# Altium footprint library WE-HCFT.PcbLib: 57 footprints (part 1 of 4)
Each footprint in its own frame and in the unit in brackets; x right, y up, seen from the top. Pads: shape width x height; smd on the part's side, far side on the other; paste and mask are expansions set on the pad; w line width, h text height; cw(c..) or ccw(c..) is an arc to the next point about the centre after c.
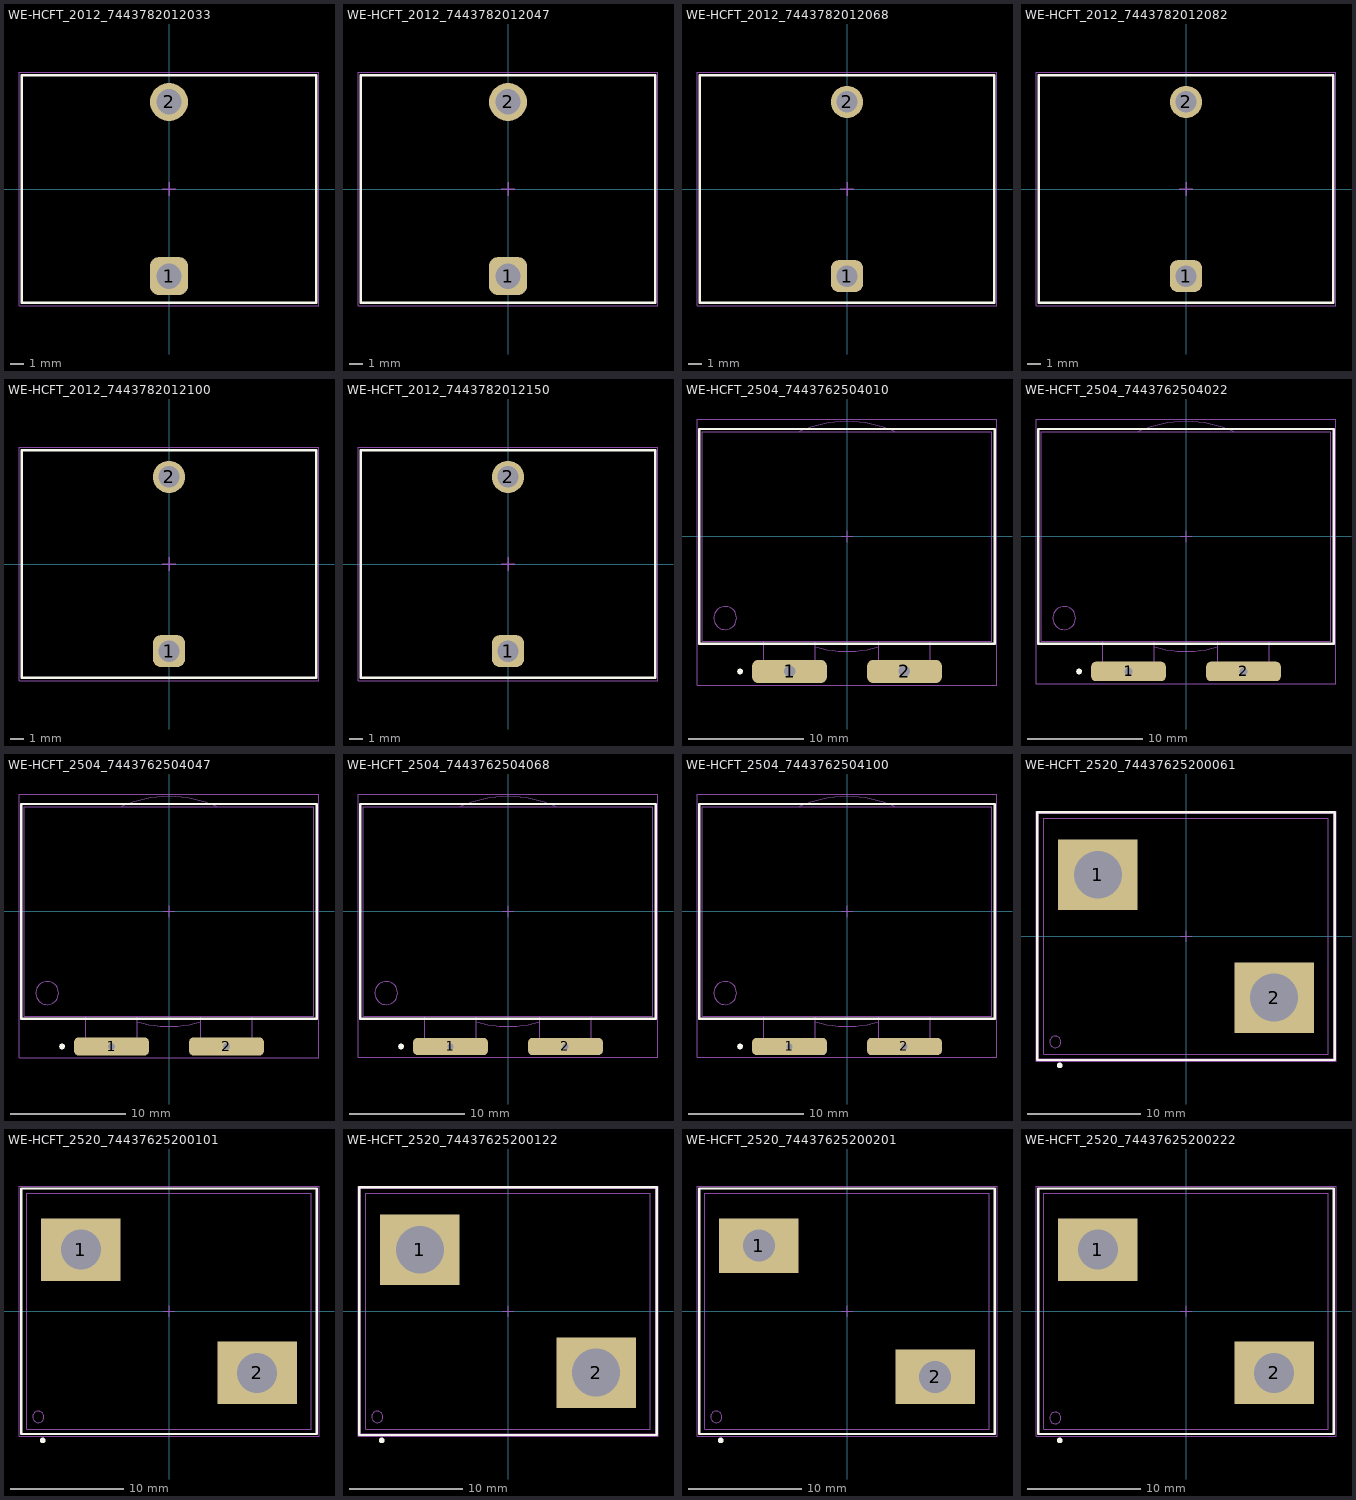
[diagram p0: the footprints below, top view; thin cyan lines are the x and y axes]

## WE-HCFT_2012_7443782012033 [mm] "THT High Current Inductor, body 22x17mm"
height 13.5
pads (2):
  rrect50% 2.85x2.85 hole 1.9: 1(0,-6.5)
  round 2.85 hole 1.9: 2(0,6.5)
Top Overlay:
  lines w0.2: -11,-8.5 11,-8.5 11,8.5 -11,8.5 -11,-8.5
Top Assembly:
  lines w0.1: -11,-8.5 11,-8.5 11,8.5 -11,8.5 -11,-8.5
Top Designator:
  text ".Designator" at -3.647,-0.357 h1
Top 3D Body:
  lines w0.1: -11,-8.5 -11,8.5 11,8.5 11,-8.5 -11,-8.5
Top Courtyard:
  lines w0.05: -11.2,-8.7 11.2,-8.7 11.2,8.7 -11.2,8.7 -11.2,-8.7
Top Component Center:
  lines w0.1: -0.5,0 0.5,0 ; 0,-0.5 0,0.5
3D body "2012_7443782012xxx_1,5 wire.stp": height 13.18, standoff -3.72, extent -10.584,-7.447 10.584,7.45

## WE-HCFT_2012_7443782012047 [mm] "THT High Current Inductor, body 22x17mm"
height 13.5
pads (2):
  rrect50% 2.85x2.85 hole 1.9: 1(0,-6.5)
  round 2.85 hole 1.9: 2(0,6.5)
Top Overlay:
  lines w0.2: -11,-8.5 -11,8.5 11,8.5 11,-8.5 -11,-8.5
Top Assembly:
  lines w0.1: -11,-8.5 -11,8.5 11,8.5 11,-8.5 -11,-8.5
Top Designator:
  text ".Designator" at -3.647,-0.357 h1
Top 3D Body:
  lines w0.1: -11,-8.5 11,-8.5 11,8.5 -11,8.5 -11,-8.5
Top Courtyard:
  lines w0.05: -11.2,-8.7 -11.2,8.7 11.2,8.7 11.2,-8.7 -11.2,-8.7
Top Component Center:
  lines w0.1: -0.5,0 0.5,0 ; 0,-0.5 0,0.5
3D body "2012_7443782012xxx_1,5 wire.stp": height 13.18, standoff -3.72, extent -10.584,-7.447 10.584,7.45

## WE-HCFT_2012_7443782012068 [mm] "THT High Current Inductor, body 22x17mm"
height 13.5
pads (2):
  rrect50% 2.4x2.4 hole 1.6: 1(0,-6.5)
  round 2.4 hole 1.6: 2(0,6.5)
Top Overlay:
  lines w0.2: -11,-8.5 -11,8.5 11,8.5 11,-8.5 -11,-8.5
Top Assembly:
  lines w0.1: -11,-8.5 -11,8.5 11,8.5 11,-8.5 -11,-8.5
Top Designator:
  text ".Designator" at -3.647,-0.357 h1
Top 3D Body:
  lines w0.1: -11,-8.5 11,-8.5 11,8.5 -11,8.5 -11,-8.5
Top Courtyard:
  lines w0.05: -11.2,-8.7 -11.2,8.7 11.2,8.7 11.2,-8.7 -11.2,-8.7
Top Component Center:
  lines w0.1: -0.5,0 0.5,0 ; 0,-0.5 0,0.5
3D body "7443782012xxx_1,2 wire.stp": height 13.18, standoff -3.72, extent -10.584,-7.099 10.584,7.352

## WE-HCFT_2012_7443782012082 [mm] "THT High Current Inductor, body 22x17mm"
height 13.5
pads (2):
  rrect50% 2.4x2.4 hole 1.6: 1(0,-6.5)
  round 2.4 hole 1.6: 2(0,6.5)
Top Overlay:
  lines w0.2: -11,-8.5 11,-8.5 11,8.5 -11,8.5 -11,-8.5
Top Assembly:
  lines w0.1: -11,-8.5 11,-8.5 11,8.5 -11,8.5 -11,-8.5
Top Designator:
  text ".Designator" at -3.647,-0.357 h1
Top 3D Body:
  lines w0.1: -11,-8.5 -11,8.5 11,8.5 11,-8.5 -11,-8.5
Top Courtyard:
  lines w0.05: -11.2,-8.7 11.2,-8.7 11.2,8.7 -11.2,8.7 -11.2,-8.7
Top Component Center:
  lines w0.1: -0.5,0 0.5,0 ; 0,-0.5 0,0.5
3D body "7443782012xxx_1,2 wire.stp": height 13.18, standoff -3.72, extent -10.584,-7.099 10.584,7.352

## WE-HCFT_2012_7443782012100 [mm] "THT High Current Inductor, body 22x17mm"
height 13.5
pads (2):
  rrect50% 2.4x2.4 hole 1.6: 1(0,-6.5)
  round 2.4 hole 1.6: 2(0,6.5)
Top Overlay:
  lines w0.2: -11,-8.5 11,-8.5 11,8.5 -11,8.5 -11,-8.5
Top Assembly:
  lines w0.1: -11,-8.5 11,-8.5 11,8.5 -11,8.5 -11,-8.5
Top Designator:
  text ".Designator" at -3.647,-0.357 h1
Top 3D Body:
  lines w0.1: -11,-8.5 -11,8.5 11,8.5 11,-8.5 -11,-8.5
Top Courtyard:
  lines w0.05: -11.2,-8.7 11.2,-8.7 11.2,8.7 -11.2,8.7 -11.2,-8.7
Top Component Center:
  lines w0.1: -0.5,0 0.5,0 ; 0,-0.5 0,0.5
3D body "7443782012xxx_1,2 wire.stp": height 13.18, standoff -3.72, extent -10.584,-7.099 10.584,7.352

## WE-HCFT_2012_7443782012150 [mm] "THT High Current Inductor, body 22x17mm"
height 13.5
pads (2):
  rrect50% 2.4x2.4 hole 1.6: 1(0,-6.5)
  round 2.4 hole 1.6: 2(0,6.5)
Top Overlay:
  lines w0.2: -11,-8.5 11,-8.5 11,8.5 -11,8.5 -11,-8.5
Top Assembly:
  lines w0.1: -11,-8.5 11,-8.5 11,8.5 -11,8.5 -11,-8.5
Top Designator:
  text ".Designator" at -3.647,-0.357 h1
Top 3D Body:
  lines w0.1: -11,-8.5 -11,8.5 11,8.5 11,-8.5 -11,-8.5
Top Courtyard:
  lines w0.05: -11.2,-8.7 11.2,-8.7 11.2,8.7 -11.2,8.7 -11.2,-8.7
Top Component Center:
  lines w0.1: -0.5,0 0.5,0 ; 0,-0.5 0,0.5
3D body "7443782012xxx_1,2 wire.stp": height 13.18, standoff -3.72, extent -10.584,-7.099 10.584,7.352

## WE-HCFT_2504_7443762504010 [mm] "Flat THT High Current Inductor, body 25.2x18.2mm"
height 4.1
pads (2):
  rrect50% 6.5x2 hole 1 square: 1(-5,-11.75) 2(5,-11.75)
Top Overlay:
  circle w0.25: c-9.3,-11.75 r0.125
  lines w0.2: -12.85,-9.35 12.85,-9.35 12.85,9.35 -12.85,9.35 -12.85,-9.35
Top Assembly:
  circle w0.1: c-10.6,-7.1 r1
  lines w0.1: -7.25,-9.1 -7.25,-12 -2.75,-12 -2.75,-9.1 ; -4.142,9.102 cw(c0,0) 4.142,9.102 ; -2.746,-9.616 ccw(c0,0) 2.742,-9.617 ; 2.75,-9.1 2.75,-12 7.25,-12 7.25,-9.1 ; -12.6,-9.1 -12.6,9.1 12.6,9.1 12.6,-9.1 -12.6,-9.1
Top Designator:
  text ".Designator" at -3.647,-0.357 h1
Top 3D Body:
  lines w0.1: -7.25,-9.1 -7.25,-12 -2.75,-12 -2.75,-9.1 ; -4.142,9.102 cw(c0,0) 4.142,9.102 ; -2.746,-9.616 ccw(c0,0) 2.742,-9.617 ; 2.75,-9.1 2.75,-12 7.25,-12 7.25,-9.1 ; -12.6,-9.1 12.6,-9.1 12.6,9.1 -12.6,9.1 -12.6,-9.1
Top Courtyard:
  lines w0.05: 0,-0.5 0,0.5 ; -13.05,-12.95 -13.05,10.2 13.05,10.2 13.05,-12.95 -13.05,-12.95
Top Component Center:
  lines w0.1: -0.5,0 0.5,0 ; 0,-0.5 0,0.5
3D body "7443762504010.stp": height 4.15, standoff -3.45, extent -12.6,-12 12.6,10

## WE-HCFT_2504_7443762504022 [mm] "Flat THT High Current Inductor, body 25.2x18.2mm"
height 4.1
pads (2):
  rrect50% 6.5x1.7 hole 0.7 square: 1(-5,-11.75) 2(5,-11.75)
Top Overlay:
  circle w0.25: c-9.3,-11.75 r0.125
  lines w0.2: -12.85,-9.35 -12.85,9.35 12.85,9.35 12.85,-9.35 -12.85,-9.35
Top Assembly:
  circle w0.1: c-10.6,-7.1 r1
  lines w0.1: -7.25,-9.1 -7.25,-12 -2.75,-12 -2.75,-9.1 ; -4.142,9.102 cw(c0,0) 4.142,9.102 ; -2.746,-9.616 ccw(c0,0) 2.742,-9.617 ; 2.75,-9.1 2.75,-12 7.25,-12 7.25,-9.1 ; -12.6,-9.1 12.6,-9.1 12.6,9.1 -12.6,9.1 -12.6,-9.1
Top Designator:
  text ".Designator" at -3.647,-0.357 h1
Top 3D Body:
  lines w0.1: -7.25,-9.1 -7.25,-12 -2.75,-12 -2.75,-9.1 ; -4.142,9.102 cw(c0,0) 4.142,9.102 ; -2.746,-9.616 ccw(c0,0) 2.742,-9.617 ; 2.75,-9.1 2.75,-12 7.25,-12 7.25,-9.1 ; -12.6,-9.1 -12.6,9.1 12.6,9.1 12.6,-9.1 -12.6,-9.1
Top Courtyard:
  lines w0.05: -13.05,-12.8 13.05,-12.8 13.05,10.2 -13.05,10.2 -13.05,-12.8
Top Component Center:
  lines w0.1: -0.5,0 0.5,0 ; 0,-0.5 0,0.5
3D body "7443762504022.stp": height 4.15, standoff -3.45, extent -12.6,-12 12.6,10

## WE-HCFT_2504_7443762504047 [mm] "Flat THT High Current Inductor, body 25.2x18.2mm"
height 4.1
pads (2):
  rrect50% 6.5x1.6 hole 0.6 square: 1(-5,-11.75) 2(5,-11.75)
Top Overlay:
  circle w0.25: c-9.3,-11.75 r0.125
  lines w0.2: -12.85,-9.35 12.85,-9.35 12.85,9.35 -12.85,9.35 -12.85,-9.35
Top Assembly:
  circle w0.1: c-10.6,-7.1 r1
  lines w0.1: -7.25,-9.1 -7.25,-12 -2.75,-12 -2.75,-9.1 ; -4.142,9.102 cw(c0,0) 4.142,9.102 ; -2.746,-9.616 ccw(c0,0) 2.742,-9.617 ; 2.75,-9.1 2.75,-12 7.25,-12 7.25,-9.1 ; -12.6,-9.1 -12.6,9.1 12.6,9.1 12.6,-9.1 -12.6,-9.1
Top Designator:
  text ".Designator" at -3.647,-0.357 h1
Top 3D Body:
  lines w0.1: -7.25,-9.1 -7.25,-12 -2.75,-12 -2.75,-9.1 ; -4.142,9.102 cw(c0,0) 4.142,9.102 ; -2.746,-9.616 ccw(c0,0) 2.742,-9.617 ; 2.75,-9.1 2.75,-12 7.25,-12 7.25,-9.1 ; -12.6,-9.1 12.6,-9.1 12.6,9.1 -12.6,9.1 -12.6,-9.1
Top Courtyard:
  lines w0.05: -13.05,-12.75 -13.05,10.2 13.05,10.2 13.05,-12.75 -13.05,-12.75
Top Component Center:
  lines w0.1: -0.5,0 0.5,0 ; 0,-0.5 0,0.5
3D body "7443762504047.stp": height 4.15, standoff -3.45, extent -12.6,-12 12.6,10

## WE-HCFT_2504_7443762504068 [mm] "Flat THT High Current Inductor, body 25.2x18.2mm"
height 4.1
pads (2):
  rrect50% 6.5x1.5 hole 0.5 square: 1(-5,-11.75) 2(5,-11.75)
Top Overlay:
  circle w0.25: c-9.3,-11.75 r0.125
  lines w0.2: -12.85,-9.35 12.85,-9.35 12.85,9.35 -12.85,9.35 -12.85,-9.35
Top Assembly:
  circle w0.1: c-10.6,-7.1 r1
  lines w0.1: -7.25,-9.1 -7.25,-12 -2.75,-12 -2.75,-9.1 ; -4.142,9.102 cw(c0,0) 4.142,9.102 ; -2.746,-9.616 ccw(c0,0) 2.742,-9.617 ; 2.75,-9.1 2.75,-12 7.25,-12 7.25,-9.1 ; -12.6,-9.1 -12.6,9.1 12.6,9.1 12.6,-9.1 -12.6,-9.1
Top Designator:
  text ".Designator" at -3.647,-0.357 h1
Top 3D Body:
  lines w0.1: -7.25,-9.1 -7.25,-12 -2.75,-12 -2.75,-9.1 ; -4.142,9.102 cw(c0,0) 4.142,9.102 ; -2.746,-9.616 ccw(c0,0) 2.742,-9.617 ; 2.75,-9.1 2.75,-12 7.25,-12 7.25,-9.1 ; -12.6,-9.1 12.6,-9.1 12.6,9.1 -12.6,9.1 -12.6,-9.1
Top Courtyard:
  lines w0.05: -13.05,-12.7 -13.05,10.2 13.05,10.2 13.05,-12.7 -13.05,-12.7
Top Component Center:
  lines w0.1: -0.5,0 0.5,0 ; 0,-0.5 0,0.5
3D body "7443762504100.stp": height 4.15, standoff -3.45, extent -12.6,-12 12.6,10

## WE-HCFT_2504_7443762504100 [mm] "Flat THT High Current Inductor, body 25.2x18.2mm"
height 4.1
pads (2):
  rrect50% 6.5x1.5 hole 0.5 square: 1(-5,-11.75) 2(5,-11.75)
Top Overlay:
  circle w0.25: c-9.3,-11.75 r0.125
  lines w0.2: -12.85,-9.35 12.85,-9.35 12.85,9.35 -12.85,9.35 -12.85,-9.35
Top Assembly:
  circle w0.1: c-10.6,-7.1 r1
  lines w0.1: -7.25,-9.1 -7.25,-12 -2.75,-12 -2.75,-9.1 ; -4.142,9.102 cw(c0,0) 4.142,9.102 ; -2.746,-9.616 ccw(c0,0) 2.742,-9.617 ; 2.75,-9.1 2.75,-12 7.25,-12 7.25,-9.1 ; -12.6,-9.1 -12.6,9.1 12.6,9.1 12.6,-9.1 -12.6,-9.1
Top Designator:
  text ".Designator" at -3.647,-0.357 h1
Top 3D Body:
  lines w0.1: -7.25,-9.1 -7.25,-12 -2.75,-12 -2.75,-9.1 ; -4.142,9.102 cw(c0,0) 4.142,9.102 ; -2.746,-9.616 ccw(c0,0) 2.742,-9.617 ; 2.75,-9.1 2.75,-12 7.25,-12 7.25,-9.1 ; -12.6,-9.1 12.6,-9.1 12.6,9.1 -12.6,9.1 -12.6,-9.1
Top Courtyard:
  lines w0.05: -13.05,-12.7 -13.05,10.2 13.05,10.2 13.05,-12.7 -13.05,-12.7
Top Component Center:
  lines w0.1: -0.5,0 0.5,0 ; 0,-0.5 0,0.5
3D body "7443762504100.stp": height 4.15, standoff -3.45, extent -12.6,-12 12.6,10

## WE-HCFT_2520_74437625200061 [mm] "THT High Current Inductor, body 25.00 x 20.80 mm"
height 21.75
pads (2):
  rect 7x6.2 hole 4.2 square: 1(-7.75,5.4) 2(7.75,-5.4)
Top Overlay:
  circle w0.25: c-11.114,-11.364 r0.125
  lines w0.2: -13.1,-10.9 13.1,-10.9 13.1,10.9 -13.1,10.9 -13.1,-10.9
Top Assembly:
  circle w0.1: c-11.5,-9.3 r0.5
  lines w0.1: -13,-10.8 -13,10.8 13,10.8 13,-10.8 -13,-10.8
Top Designator:
  text ".Designator" at -3.647,-0.357 h1
Top 3D Body:
  lines w0.1: -12.5,-10.4 12.5,-10.4 12.5,10.4 -12.5,10.4 -12.5,-10.4
Top Courtyard:
  lines w0.05: -13.2,-11 -13.2,11 13.2,11 13.2,-11 -13.2,-11
Top Component Center:
  lines w0.1: -0.5,0 0.5,0 ; 0,-0.5 0,0.5
3D body "74437625200061.stp": height 21.9, standoff -3.85, extent -12.5,-10.4 12.5,10.4

## WE-HCFT_2520_74437625200101 [mm] "THT High Current Inductor, body 25.00 x 20.80 mm"
height 21.75
pads (2):
  rect 7x5.5 hole 3.5 square: 1(-7.75,5.425) 2(7.75,-5.425)
Top Overlay:
  circle w0.25: c-11.114,-11.364 r0.125
  lines w0.2: -13,-10.8 13,-10.8 13,10.8 -13,10.8 -13,-10.8
Top Assembly:
  circle w0.1: c-11.5,-9.3 r0.5
  lines w0.1: -13,-10.8 13,-10.8 13,10.8 -13,10.8 -13,-10.8
Top Designator:
  text ".Designator" at -3.647,-0.357 h1
Top 3D Body:
  circle w0.1: c-11.5,-9.3 r0.5
  lines w0.1: -12.5,-10.4 -12.5,10.4 12.5,10.4 12.5,-10.4 -12.5,-10.4
Top Courtyard:
  lines w0.05: -13.2,-11 -13.2,11 13.2,11 13.2,-11 -13.2,-11
Top Component Center:
  lines w0.1: -0.5,0 0.5,0 ; 0,-0.5 0,0.5
3D body "74437625200101.stp": height 21.9, standoff -3.85, extent -12.5,-10.4 12.5,10.4

## WE-HCFT_2520_74437625200122 [mm] "THT High Current Inductor, body 25.00 x 20.80 mm"
height 21.75
pads (2):
  rect 7x6.2 hole 4.2 square: 1(-7.75,5.4) 2(7.75,-5.4)
Top Overlay:
  circle w0.25: c-11.114,-11.364 r0.125
  lines w0.2: -13.1,-10.9 13.1,-10.9 13.1,10.9 -13.1,10.9 -13.1,-10.9
Top Assembly:
  circle w0.1: c-11.5,-9.3 r0.5
  lines w0.1: -13,-10.8 13,-10.8 13,10.8 -13,10.8 -13,-10.8
Top Designator:
  text ".Designator" at -3.647,-0.357 h1
Top 3D Body:
  lines w0.1: -12.5,-10.4 -12.5,10.4 12.5,10.4 12.5,-10.4 -12.5,-10.4 ; -12.5,-10.4 -12.5,-10.4
Top Courtyard:
  lines w0.05: -13.2,-11 -13.2,11 13.2,11 13.2,-11 -13.2,-11
Top Component Center:
  lines w0.1: -0.5,0 0.5,0 ; 0,-0.5 0,0.5
3D body "74437625200122.stp": height 21.9, standoff -3.85, extent -12.5,-10.4 12.5,10.4

## WE-HCFT_2520_74437625200201 [mm] "THT High Current Inductor, body 25.00 x 20.80 mm"
height 21.75
pads (2):
  rect 7x4.8 hole 2.8 square: 1(-7.75,5.775) 2(7.75,-5.775)
Top Overlay:
  circle w0.25: c-11.114,-11.364 r0.125
  lines w0.2: -13,-10.8 13,-10.8 13,10.8 -13,10.8 -13,-10.8
Top Assembly:
  circle w0.1: c-11.5,-9.3 r0.5
  lines w0.1: -13,-10.8 13,-10.8 13,10.8 -13,10.8 -13,-10.8
Top Designator:
  text ".Designator" at -3.647,-0.357 h1
Top 3D Body:
  circle w0.1: c-11.5,-9.3 r0.5
  lines w0.1: -12.5,-10.4 -12.5,10.4 12.5,10.4 12.5,-10.4 -12.5,-10.4
Top Courtyard:
  lines w0.05: -13.2,-11 -13.2,11 13.2,11 13.2,-11 -13.2,-11
Top Component Center:
  lines w0.1: -0.5,0 0.5,0 ; 0,-0.5 0,0.5
3D body "74437625200201.stp": height 21.9, standoff -3.85, extent -12.5,-10.4 12.5,10.4

## WE-HCFT_2520_74437625200222 [mm] "THT High Current Inductor, body 25.00 x 20.80 mm"
height 21.75
pads (2):
  rect 7x5.5 hole 3.5 square: 1(-7.75,5.425) 2(7.75,-5.425)
Top Overlay:
  circle w0.25: c-11.114,-11.364 r0.125
  lines w0.2: -13,-10.8 13,-10.8 13,10.8 -13,10.8 -13,-10.8
Top Assembly:
  circle w0.1: c-11.5,-9.4 r0.5
  lines w0.1: -13,-10.8 13,-10.8 13,10.8 -13,10.8 -13,-10.8
Top Designator:
  text ".Designator" at -3.647,-0.357 h1
Top 3D Body:
  circle w0.1: c-11.5,-9.4 r0.5
  lines w0.1: -12.5,-10.4 12.5,-10.4 12.5,10.4 -12.5,10.4 -12.5,-10.4
Top Courtyard:
  lines w0.05: -13.2,-11 13.2,-11 13.2,11 -13.2,11 -13.2,-11
Top Component Center:
  lines w0.1: -0.5,0 0.5,0 ; 0,-0.5 0,0.5
3D body "74437625200222.stp": height 21.9, standoff -3.85, extent -12.5,-10.4 12.5,10.4